# Altium schematic symbol library TitansLib.SchLib: 462 symbols (part 13 of 24)
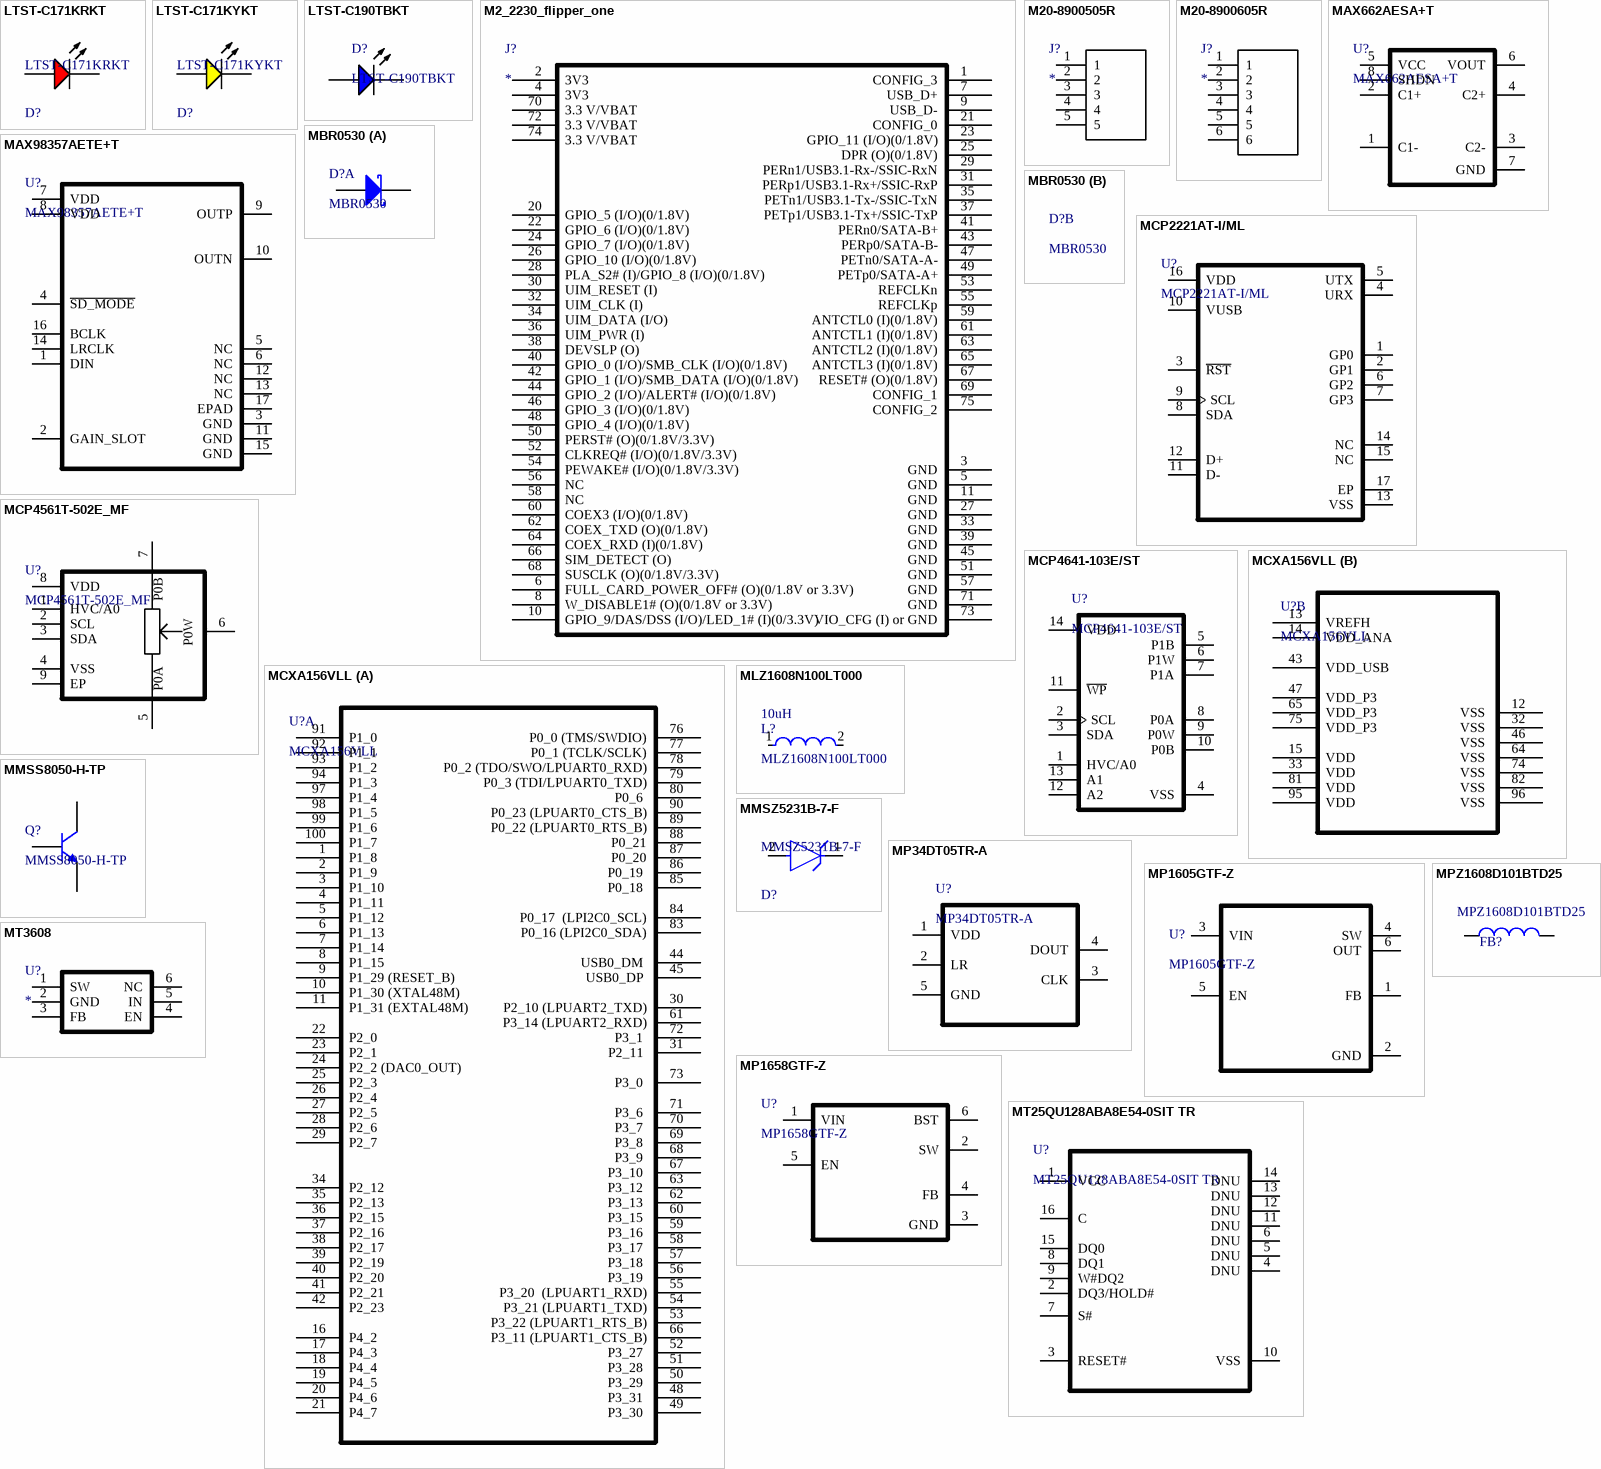
[diagram p29: symbols LTST-C171KRKT to MT3608]

## MCXA156VLL
designator U?
MCU 32-bit ARM Cortex M33 RISC 1MB Flash 1.8V/2.5V/3.3V 100-Pin LQFP Tray; Manufacturer: NXP Semiconductors; Supplier 1: DigiKey; Supplier Part Number 1: 568-MCXA156VLL-ND; Supplier 2: Mouser; Supplier Part Number 2: 771-MCXA156VLL; Supplier: DigiKey; Supplier Part Number: 568-MCXA156VLL-ND; Manufacturer Part Number: MCXA156VLL; RoHS: Compliant; Category: Microcontrollers; Stock: 277; Pricing: 1=6,93, 10=5,334, 90=4,52222, 180=4,35389, 270=4,26963, 540=4,14598, 1080=4,04424, 2520=3,94399 (USD); Lifecycle Status: Production; REACH SVHC: Yes; ComponentLink1URL: http://sigma.octopart.com:80/reach_statement/NXP-Semiconductors-company-13.pdf?src-supplier=Compliance+Statements; ComponentLink1Description: http://sigma.octopart.com:80/reach_statement/NXP-Semiconductors-company-13.pdf?src-supplier=Compliance+Statements; ComponentLink2URL: http://sigma.octopart.com:80/rohs_statement/NXP-Semiconductors-company-12.pdf?src-supplier=Compliance+Statements; ComponentLink2Description: http://sigma.octopart.com:80/rohs_statement/NXP-Semiconductors-company-12.pdf?src-supplier=Compliance+Statements
footprint MCXA156VLL (SQFP, 100-Leads, Body 14,00x14,00mm, Pitch 0,50mm, IPC Medium Density)
part A pins: 1 P1_8, 2 P1_9, 3 P1_10, 4 P1_11, 5 P1_12, 6 P1_13, 7 P1_14 , 8 P1_15 , 9 P1_29 (RESET_B), 10 P1_30 (XTAL48M), 11 P1_31 (EXTAL48M), 16 P4_2 , 17 P4_3 , 18 P4_4 , 19 P4_5 , 20 P4_6 , 21 P4_7 , 22 P2_0 , 23 P2_1 , 24 P2_2 (DAC0_OUT), 25 P2_3 , 26 P2_4 , 27 P2_5 , 28 P2_6 , 29 P2_7 , 30 P2_10 (LPUART2_TXD), 31 P2_11 , 34 P2_12 , 35 P2_13 , 36 P2_15 , 37 P2_16 , 38 P2_17 , 39 P2_19 , 40 P2_20 , 41 P2_21 , 42 P2_23 , 44 USB0_DM , 45 USB0_DP , 48 P3_31 , 49 P3_30 , 50 P3_29 , 51 P3_28 , 52 P3_27 , 53 P3_22 (LPUART1_RTS_B), 54 P3_21 (LPUART1_TXD), 55 P3_20  (LPUART1_RXD), 56 P3_19 , 57 P3_18 , 58 P3_17 , 59 P3_16 , 60 P3_15 , 61 P3_14 (LPUART2_RXD), 62 P3_13 , 63 P3_12 , 66 P3_11 (LPUART1_CTS_B), 67 P3_10 , 68 P3_9 , 69 P3_8 , 70 P3_7 , 71 P3_6 , 72 P3_1 , 73 P3_0 , 76 P0_0 (TMS/SWDIO), 77 P0_1 (TCLK/SCLK), 78 P0_2 (TDO/SWO/LPUART0_RXD), 79 P0_3 (TDI/LPUART0_TXD), 80 P0_6 , 83 P0_16 (LPI2C0_SDA), 84 P0_17  (LPI2C0_SCL), 85 P0_18 , 86 P0_19 , 87 P0_20, 88 P0_21, 89 P0_22 (LPUART0_RTS_B), 90 P0_23 (LPUART0_CTS_B), 91 P1_0 , 92 P1_1 , 93 P1_2 , 94 P1_3 , 97 P1_4 , 98 P1_5, 99 P1_6, 100 P1_7
part B pins: 12 VSS , 13 VREFH , 14 VDD_ANA , 15 VDD , 32 VSS , 33 VDD , 43 VDD_USB , 46 VSS , 47 VDD_P3 , 64 VSS , 65 VDD_P3 , 74 VSS , 75 VDD_P3 , 81 VDD , 82 VSS , 95 VDD , 96 VSS 

## MLZ1608N100LT000
designator L?  value 10uH
Inductor Power Shielded Multi-Layer 10uH 20% 2MHz Ferrite 0.06A 0.78Ohm DCR 0603 T/R; Manufacturer: TDK; Manufacturer Lifecycle Status: PRODUCTION; Current Rating: 300mA; DC Resistance (DCR): 780mΩ; Number of Circuits: 1; Saturation Current: 60mA; Self Resonant Frequency: 50MHz; Supplier: DigiKey; Supplier Part Number: 445-6755-1-ND; Manufacturer Part Number: MLZ1608N100LT000; RoHS: Compliant; Category: Fixed Inductors; Stock: 627893; Pricing: 1=0.1, 10=0.082, 100=0.0677, 1000=0.0557 (USD); Case/Package: 0603; Case Code (Imperial): 0603; Case Code (Metric): 1608; Core Material: Ferrite; Height: 800µm; Height - Seated (Max): 939.8µm; Lead Free: Lead Free; Length: 1.6mm; Lifecycle Status: Production; Max Current Rating: 300mA; Max Length: 1.75mm; Max Operating Temperature: 125°C; Max Width: 950µm; Min Length: 1.45mm; Min Operating Temperature: -55°C; Min Width: 650µm; Mounting Technology: Surface Mount; Number of Terminals: 2; Packaging: Tape & Reel (TR); REACH SVHC: Yes; RMS Current (Irms): 300mA; Schedule B: 8504500000, 8504500000|8504500000|8504500000|8504500000|8504500000|8504500000|8504500000|8504500000|8504500000|8504500000|8504500000|8504500000|8504500000|8504500000|8504500000|8504500000|8504500000|8504500000|8504500000|8504500000|8504500000|8504500000|8504500000|85; ESR: 780mΩ; Shielding: Shielded; Test Frequency: 2MHz; Tolerance: 20%; Width: 800µm; ComponentLink1URL: https://datasheet.octopart.com:443/MLZ1608N100LT000-TDK-datasheet-155327068.pdf?src-supplier=ODG+(Origin+Data+Global); ComponentLink1Description: https://datasheet.octopart.com:443/MLZ1608N100LT000-TDK-datasheet-155327068.pdf?src-supplier=ODG+(Origin+Data+Global); ComponentLink2URL: https://datasheet.octopart.com:443/MLZ1608N100LT000-TDK-datasheet-170576133.pdf?src-supplier=IHS; ComponentLink2Description: https://datasheet.octopart.com:443/MLZ1608N100LT000-TDK-datasheet-170576133.pdf?src-supplier=IHS; ComponentLink3URL: https://datasheet.octopart.com:443/MLZ1608N100LT000-TDK-datasheet-62316133.pdf?src-supplier=Newark; ComponentLink3Description: https://datasheet.octopart.com:443/MLZ1608N100LT000-TDK-datasheet-62316133.pdf?src-supplier=Newark; ComponentLink4URL: https://datasheet.octopart.com:443/MLZ1608N100LT000-TDK-datasheet-136874818.pdf?src-supplier=TME; ComponentLink4Description: https://datasheet.octopart.com:443/MLZ1608N100LT000-TDK-datasheet-136874818.pdf?src-supplier=TME; ComponentLink5URL: https://datasheet.octopart.com:443/MLZ1608N100LT000-TDK-datasheet-164882308.pdf?src-supplier=Burklin+Elektronik; ComponentLink5Description: https://datasheet.octopart.com:443/MLZ1608N100LT000-TDK-datasheet-164882308.pdf?src-supplier=Burklin+Elektronik
footprint INDC1006X08N (Chip Inductor, 2-Leads, Body 1.00x0.60mm, IPC Medium Density)
pins: 1, 2

## MMSS8050-H-TP
designator Q?
Small Signal Bipolar Transistor, 1.5A I(C), 25V V(BR)CEO, 1-Element, NPN, Silicon; Manufacturer: MCC; Package Body Material: Plastic; DC Current Gain-Min (hFE): 200; Number of Elements: 1; Power Dissipation-Max (Abs): 300mW; Time @ Peak Reflow Temperature-Max (s): 10s; Frequency: 100MHz; Qualification Status: Not Qualified; Supplier: Mouser; Supplier Part Number: 833-MMSS8050-H-TP; Manufacturer Part Number: MMSS8050-H-TP; RoHS: Yes; Category: BJTs; Stock: 8044; Pricing: 1=0.14, 10=0.083, 50=0.083, 100=0.052, 1000=0.033, 10000=0.022 (USD); Pins: 3; Package Shape: Rectangular; Terminal Finish: Tin; Transistor Element Material: SILICON; Max Operating Temperature: 150°C; JESD-609 Code: e3; Polarity/Channel Type: NPN; Max Collector Current: 1.5A; Collector-emitter Voltage-Max: 25V; JESD-30 Code: R-PDSO-G3; Moisture Sensitivity Level: 1; Package Style: SMALL OUTLINEMeter; Peak Reflow Temperature (Cel): 260°C; Surface Mount: Yes; Terminal Form: Gull Wing; Terminal Position: DUAL; Reach SVHC Compliant: Yes; RoHS Compliant: Yes; ComponentLink1URL: https://datasheet.ciiva.com:443/pdfs/VipMasterIC/IC/MCCC/MCCC-S-A0009689717/MCCC-S-A0009689962-1.pdf?src-supplier=IHS+Markit; ComponentLink1Description: https://datasheet.ciiva.com:443/pdfs/VipMasterIC/IC/MCCC/MCCC-S-A0009689717/MCCC-S-A0009689962-1.pdf?src-supplier=IHS+Markit; ComponentLink2URL: https://datasheet.ciiva.com/16291/mmss8050-255048-16291447.pdf?src-supplier=Mouser; ComponentLink2Description: https://datasheet.ciiva.com/16291/mmss8050-255048-16291447.pdf?src-supplier=Mouser; ComponentLink3URL: https://datasheet.ciiva.com/972/mmss8050sot-23-972893.pdf?src-supplier=Digikey; ComponentLink3Description: https://datasheet.ciiva.com/972/mmss8050sot-23-972893.pdf?src-supplier=Digikey; ComponentLink4URL: https://datasheet.ciiva.com/972/mmss8050sot-23-972894.pdf?src-supplier=Digikey; ComponentLink4Description: https://datasheet.ciiva.com/972/mmss8050sot-23-972894.pdf?src-supplier=Digikey; ComponentLink5URL: https://datasheet.ciiva.com/972/mmss8050sot-23-972895.pdf?src-supplier=Digikey; ComponentLink5Description: https://datasheet.ciiva.com/972/mmss8050sot-23-972895.pdf?src-supplier=Digikey
footprint SI1308EDL
pins: 1 B, 2 E, 3 C

## MMSZ5231B-7-F
designator D?
MMSZ5231B-7 Series 500 mW 5.1 V 10 mA Surface Mount Zener Diode - SOD-123; Manufacturer: Diodes; Standoff Height: 0mm; Max Zener Voltage: 5.36V; Max Reverse Leakage Current: 5uA; Max Junction Temp: +150°C; Nom Zener Voltage: 5.1V; Power Dissipation: 370mW; Zener Impedance: 17Ω; Element Configuration: Single; ESD Protection: No; Forward Voltage: 900mV; Max Junction Temperature (Tj): 150°C; Number of Elements: 1; Peak Reverse Current: 5µA; Polarity: Unidirectional; Power Rating: 500mW; Reverse Standoff Voltage: 2V; Test Current: 20mA; Tolerance: 5%; Voltage Tolerance: 4.99%; Temperature: -65°C to +150°C; RoHS: TRUE; ComponentLink2Description: Datasheet; Octopart: https://octopart.com/mmsz5231b-7-f-diodes+inc.-55400050; Height: 1.45mm; ComponentLink2URL: https://www.diodes.com/assets/Datasheets/ds18010.pdf; Footprint Url: https://www.diodes.com/assets/Package-Files/SOD123.pdf; Device Class L2: Diodes; Temperature Range Low: -65°C; Mouser Description: Zener Diodes 5.1V 500mW; Manufacturer Part Number: MMSZ5231B-7-F; Digikey Description: DIODE ZENER 5.1V 500MW SOD123; Device Class L1: Discrete Semiconductors; Device Class L3: Zener Diodes; Lead Free: Yes; Category: Diode; Automotive: No; Package: SOD123; Temperature Range High: +150°C; Supplier: Avnet; Supplier Part Number: MMSZ5231B-7-F; Stock: 309000; Pricing: 3000=0,01771, 6000=0,01722, 12000=0,01699, 24000=0,01676, 48000=0,01653 (USD); Case/Package: SOD-123-2; China RoHS: Compliant; Composition: Zener; Contact Plating: Tin; Country of Origin: Mainland China; Export Control Classification Number (ECCN) Code: EAR99; Harmonized Tariff Schedule (HTS) Code: 8541.10.00.50; Impedance: 17Ω; Introduction Date: 2002-09-13; Length: 3.85mm; Lifecycle Status: Production; Max Operating Temperature: 150°C; Max Power Dissipation: 370mW; Min Operating Temperature: -65°C; Mounting Technology: Surface Mount; Pins: 2; Number of Terminals: 2; Packaging: Cut Tape; Radiation Hardening: No; REACH SVHC: Yes; Reference Voltage: 5.1V; Schedule B: 8541100050, 8541100050|8541100050|8541100050|8541100050|8541100050|8541100050|8541100050|8541100050|8541100050|8541100050|8541100050|8541100050|8541100050|8541100050|8541100050|8541100050|8541100050|8541100050|8541100050|8541100050|8541100050|8541100050|8541100050|85; Termination: SMD/SMT; Voltage Rating (DC): 5.1V; Weight: 10.007382mg; Width: 1.7mm; Working Voltage: 5.1V; Zener Current: 20mA; Zener Voltage: 5.1V; ComponentLink1URL: https://datasheet.octopart.com:443/MMSZ5231B-7-F-Diodes-Inc.-datasheet-149521387.pdf?src-supplier=Newark; ComponentLink1Description: https://datasheet.octopart.com:443/MMSZ5231B-7-F-Diodes-Inc.-datasheet-149521387.pdf?src-supplier=Newark; ComponentLink3URL: https://datasheet.octopart.com:443/MMSZ5231B-7-F-Diodes-Inc.-datasheet-12519528.pdf?src-supplier=Newark; ComponentLink3Description: https://datasheet.octopart.com:443/MMSZ5231B-7-F-Diodes-Inc.-datasheet-12519528.pdf?src-supplier=Newark; ComponentLink4URL: https://datasheet.octopart.com:443/MMSZ5231B-7-F-Diodes-Inc.-datasheet-10631512.pdf?src-supplier=Newark; ComponentLink4Description: https://datasheet.octopart.com:443/MMSZ5231B-7-F-Diodes-Inc.-datasheet-10631512.pdf?src-supplier=Newark; ComponentLink5URL: https://datasheet.octopart.com:443/MMSZ5231B-7-F-Diodes-Inc.-datasheet-10407984.pdf?src-supplier=Newark; ComponentLink5Description: https://datasheet.octopart.com:443/MMSZ5231B-7-F-Diodes-Inc.-datasheet-10407984.pdf?src-supplier=Newark; ComponentLink6URL: https://datasheet.octopart.com:443/MMSZ5231B-7-F-Diodes-Inc.-datasheet-10027056.pdf?src-supplier=Newark; ComponentLink6Description: https://datasheet.octopart.com:443/MMSZ5231B-7-F-Diodes-Inc.-datasheet-10027056.pdf?src-supplier=Newark; ComponentLink7URL: https://datasheet.octopart.com:443/MMSZ5231B-7-F-Diodes-Inc.-datasheet-5320879.pdf?src-supplier=Newark; ComponentLink7Description: https://datasheet.octopart.com:443/MMSZ5231B-7-F-Diodes-Inc.-datasheet-5320879.pdf?src-supplier=Newark; ComponentLink8URL: https://sigma.octopart.com:443/138895985/technical_drawing/Diodes-Inc.-MMSZ5231B-7-F.pdf?src-supplier=Diodes+Inc+SCT; ComponentLink8Description: https://sigma.octopart.com:443/138895985/technical_drawing/Diodes-Inc.-MMSZ5231B-7-F.pdf?src-supplier=Diodes+Inc+SCT; ComponentLink9URL: https://datasheet.octopart.com:443/MMSZ5231B-7-F-Diodes-Inc.-datasheet-4024.pdf?src-supplier=DigiKey; ComponentLink9Description: https://datasheet.octopart.com:443/MMSZ5231B-7-F-Diodes-Inc.-datasheet-4024.pdf?src-supplier=DigiKey; ComponentLink10URL: https://datasheet.octopart.com:443/MMSZ5231B-7-F-Diodes-Inc.-datasheet-103774855.pdf?src-supplier=TME; ComponentLink10Description: https://datasheet.octopart.com:443/MMSZ5231B-7-F-Diodes-Inc.-datasheet-103774855.pdf?src-supplier=TME; ComponentLink11URL: https://datasheet.octopart.com:443/MMSZ5231B-7-F-Diodes-Inc.-datasheet-14050909.pdf?src-supplier=iiiC; ComponentLink11Description: https://datasheet.octopart.com:443/MMSZ5231B-7-F-Diodes-Inc.-datasheet-14050909.pdf?src-supplier=iiiC; ComponentLink12URL: https://datasheet.octopart.com:443/MMSZ5231B-7-F-Diodes-Inc.-datasheet-17703277.pdf?src-supplier=Jameco; ComponentLink12Description: https://datasheet.octopart.com:443/MMSZ5231B-7-F-Diodes-Inc.-datasheet-17703277.pdf?src-supplier=Jameco; ComponentLink13URL: http://sigma.octopart.com:80/15616952/materials_sheet/Diodes-Inc.-MMSZ5231B-7-F.pdf?src-supplier=Compliance+Statements; ComponentLink13Description: http://sigma.octopart.com:80/15616952/materials_sheet/Diodes-Inc.-MMSZ5231B-7-F.pdf?src-supplier=Compliance+Statements; Supplier 1: DigiKey; Supplier Part Number 1: MMSZ5231B-FDICT-ND; Supplier 2: DigiKey; Supplier Part Number 2: MMSZ5231B-FDIDKR-ND; Supplier 3: Mouser; Supplier Part Number 3: 621-MMSZ5231B-F
footprint MMSZ5231B-7-F (TSOP, 2-Leads, Body 1,55x2,70mm, Pitch 1,00mm, IPC Low Density)
pins: 1 C, 2 A

## MP34DT05TR-A
designator U?
Consumer Circuit, CMOS, CBGA4; Manufacturer: STMicroelectronics; Package Body Material: Metal; Channels: 1; Max Supply Voltage: 3.6V; Min Supply Voltage: 1.6V; Supplier: Digikey; Supplier Part Number: 497-17809-1-ND; Manufacturer Part Number: MP34DT05TR-A; RoHS: Yes; Category: Microphones; Stock: 111434; Pricing: 1=1.66, 10=1.35, 25=1.2436, 50=1.1694, 100=1.0995, 250=1.05264 (USD); Case/Package: LGA; Pins: 4; Package Shape: Rectangular; Terminal Finish: Nickel; Min Operating Temperature: -40°C; Max Operating Temperature: 85°C; JESD-609 Code: e4; Consumer IC Type: CONSUMER CIRCUIT; Moisture Sensitivity Level: 3; Package Style: GRID ARRAYMeter; Surface Mount: Yes; Technology: CMOS; Terminal Form: BUTT; Terminal Position: BOTTOM; Length: 4mm; Width: 3mm; Height - Seated (Max): 1.1mm; Temperature Grade: INDUSTRIAL; Reach SVHC Compliant: Yes; RoHS Compliant: Yes; ComponentLink1URL: https://datasheet.ciiva.com:443/pdfs/VipMasterIC/IC/SGST/SGST-S-A0008042494/SGST-S-A0008042494-1.pdf?src-supplier=IHS+Markit; ComponentLink1Description: https://datasheet.ciiva.com:443/pdfs/VipMasterIC/IC/SGST/SGST-S-A0008042494/SGST-S-A0008042494-1.pdf?src-supplier=IHS+Markit; ComponentLink2URL: http://www.farnell.com/datasheets/2600073.pdf?src-supplier=Farnell; ComponentLink2Description: http://www.farnell.com/datasheets/2600073.pdf?src-supplier=Farnell; ComponentLink3URL: http://www.farnell.com/datasheets/2600073.pdf?src-supplier=Newark; ComponentLink3Description: http://www.farnell.com/datasheets/2600073.pdf?src-supplier=Newark; ComponentLink4URL: http://www.farnell.com/datasheets/2600073.pdf?src-supplier=Element14; ComponentLink4Description: http://www.farnell.com/datasheets/2600073.pdf?src-supplier=Element14; ComponentLink5URL: https://datasheet.octopart.com/MP34DT05TR-A-STMicroelectronics-datasheet-101522148.pdf?src-supplier=Element14; ComponentLink5Description: https://datasheet.octopart.com/MP34DT05TR-A-STMicroelectronics-datasheet-101522148.pdf?src-supplier=Element14; ComponentLink6URL: http://www.st.com/content/ccc/resource/technical/document/datasheet/group3/c7/90/d3/f6/b7/e7/40/c8/DM00415595/files/DM00415595.pdf/jcr:content/translations/en.DM00415595.pdf?src-supplier=Digikey; ComponentLink6Description: http://www.st.com/content/ccc/resource/technical/document/datasheet/group3/c7/90/d3/f6/b7/e7/40/c8/DM00415595/files/DM00415595.pdf/jcr:content/translations/en.DM00415595.pdf?src-supplier=Digikey; Supplier 1: Digikey; Supplier Part Number 1: 497-17809-1-ND
pins: 1 VDD, 2 LR, 3 CLK, 4 DOUT, 5 GND

## MP1605GTF-Z
designator U?
2A 5.5V 2.2MHz Synchronous Step-Down Converter with Low11&micro;A Quiescent Current in SOT563 Package; Manufacturer: Monolithic Power Systems; Copyright: Copyright (C) 2025 Ultra Librarian. All rights reserved.; Manufacturer Part Number: MP1605GTF-Z; Datasheet: https://www.monolithicpower.com/en/documentview/productdocument/index/version/2/document_type/Datasheet/lang/en/sku/MP1605
footprint SOT563_MP1605_MNP-L
pins: 1 FB, 2 GND, 3 VIN, 4 SW, 5 EN, 6 OUT

## MP1658GTF-Z
designator U?
16V, 3A, 600kHz, High-Efficiency, / Synchronous, Step-Down Converter / In a SOT563 Package; Manufacturer: Monolithic Power Systems; Manufacturer Part Number: MP1658GTF-Z; Package: SOT-563
footprint SOT563_MP1605_MNP-L
pins: 1 VIN, 2 SW, 3 GND, 4 FB, 5 EN, 6 BST

## MPZ1608D101BTD25
designator FB?
100 Ohms @ 100 MHz 1 Power Line Ferrite Bead 0603 (1608 Metric) 1A 150mOhm; Manufacturer 1: TDK; Supplier 1: DigiKey; Manufacturer Part Number 1: MPZ1608D101BTD25; Supplier Part Number 1: 445-MPZ1608D101BTD25CT-ND; Supplier Link 1: https://www.digikey.com.br/en/products/detail/tdk-corporation/MPZ1608D101BTD25/5040308; Supplier Unit Price 1: 0.1
footprint INDC1005X06N (Chip Inductor, 2-Leads, Body 1.00x0.50mm, IPC Medium Density)
pins: 1, 2

## MT25QU128ABA8E54-0SIT TR
designator U?
FLASH - NOR Memory IC 128Mbit SPI - Quad I/O 133 MHz 15-XFWLBGA; Manufacturer: Micron Technology Inc.; Supper Unit Price: 7.33; Supplier: DigiKey; Supplier Part Number: 557-1989-2-ND; Supplier Link: https://www.digikey.com/en/products/detail/micron-technology-inc/MT25QU128ABA8E54-0SIT-TR/8537498; Manufaturer Part Number: MT25QU128ABA8E54-0SIT TR; Datasheet: https://mm.digikey.com/Volume0/opasdata/d220001/medias/docus/6657/MT25QU128ABA8ESF-0SIT.pdf
pins: 1 VCC, 2 DQ3/HOLD#, 3 RESET#, 4 DNU, 5 DNU, 6 DNU, 7 S#, 8 DQ1, 9 W#DQ2, 10 VSS, 11 DNU, 12 DNU, 13 DNU, 14 DNU, 15 DQ0, 16 C

## MT3608
designator U?
1.2MHz Boost Adjustable 2A SOT-23-6 Voltage Regulators - DC DC Switching Regulators RoHS; Manufacturer 1: Aerosemi; Manufacturer Part Number 1: MT3608; Datasheet Link: https://www.olimex.com/Products/Breadboarding/BB-PWR-3608/resources/MT3608.pdf; Height: 1.45mm; Supplier Part Number 1: C84817; Supplier 1: LCSC; Supplier Unit Price 1: 0.0786
footprint SOT95P280X145-6N
pins: 1 SW, 2 GND, 3 FB, 4 EN, 5 IN, 6 NC

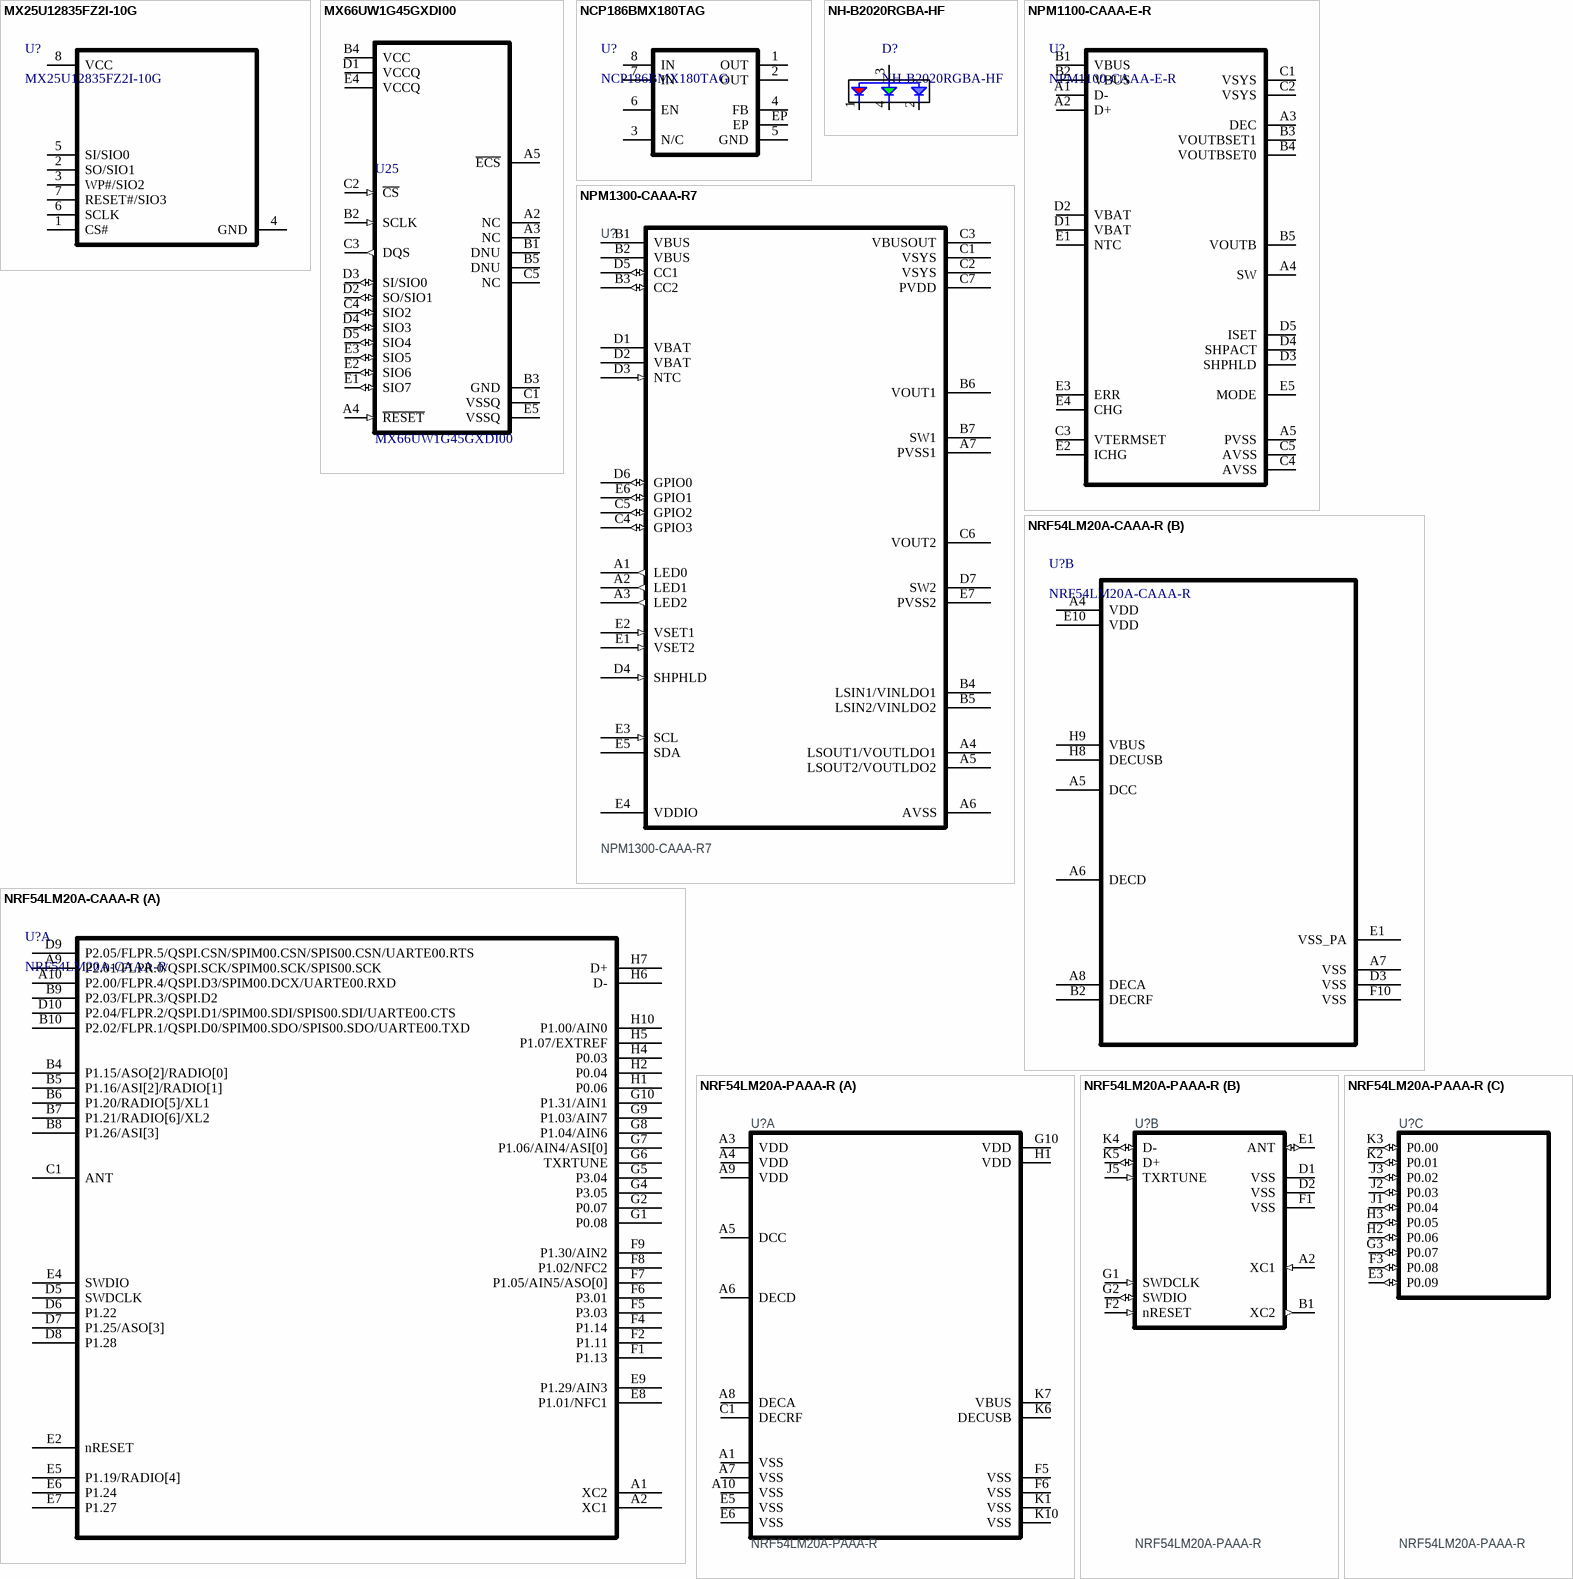
[diagram p8: symbols MX25U12835FZ2I-10G to NRF54LM20A-PAAA-R]

## MX25U12835FZ2I-10G
designator U?
MX25U Series 1.8 V 128 Mb (x 1/x 2/x 4) 104 MHz Industrial Serial Flash - WSON-8; Manufacturer: Macronix; Density: 128Mb; Frequency: 104MHz; Max Supply Current: 20mA; Max Supply Voltage: 2V; Min Supply Voltage: 1.65V; Number of Circuits: 1; Operating Supply Voltage: 1.8V; Supplier: DigiKey; Supplier Part Number: 1092-1136-ND; Manufacturer Part Number: MX25U12835FZ2I-10G; RoHS: Compliant; Category: Flash; Stock: 480; Pricing: 1=4.46, 10=4.16, 25=4.0376, 50=3.9444, 100=3.8512, 480=3.64213, 960=3.5512, 1440=3.49862 (USD); Case/Package: 104; Height - Seated (Max): 800µm; Interface: Serial; Lead Free: Lead Free; Length: 8mm; Lifecycle Status: Production; Clock Frequency: 104MHz; Max Operating Temperature: 85°C; Memory Format: FLASH; Min Operating Temperature: -40°C; Number of Terminals: 8; REACH SVHC: Yes; Schedule B: 8542320070, 8542320070|8542320070|8542320070|8542320070|8542320070; Temperature Grade: Industrial; Terminal Pitch: 1.27mm; Width: 6mm; ComponentLink1URL: https://datasheet.octopart.com:443/MX25U12835FZ2I-10G-Macronix-datasheet-134128073.pdf?src-supplier=IHS; ComponentLink1Description: https://datasheet.octopart.com:443/MX25U12835FZ2I-10G-Macronix-datasheet-134128073.pdf?src-supplier=IHS; ComponentLink2URL: https://datasheet.octopart.com:443/MX25U12835FZ2I-10G-Macronix-datasheet-137404896.pdf?src-supplier=SHENGYU+ELECTRONICS; ComponentLink2Description: https://datasheet.octopart.com:443/MX25U12835FZ2I-10G-Macronix-datasheet-137404896.pdf?src-supplier=SHENGYU+ELECTRONICS; ComponentLink3URL: https://datasheet.octopart.com:443/MX25U12835FZ2I-10G-Macronix-datasheet-101783967.pdf?src-supplier=Future+Electronics; ComponentLink3Description: https://datasheet.octopart.com:443/MX25U12835FZ2I-10G-Macronix-datasheet-101783967.pdf?src-supplier=Future+Electronics; ComponentLink4URL: https://datasheet.octopart.com:443/MX25U12835FZ2I-10G-Macronix-datasheet-15540238.pdf?src-supplier=Future+Electronics; ComponentLink4Description: https://datasheet.octopart.com:443/MX25U12835FZ2I-10G-Macronix-datasheet-15540238.pdf?src-supplier=Future+Electronics; ComponentLink5URL: https://datasheet.octopart.com:443/MX25U12835FZ2I-10G-Macronix-datasheet-24950634.pdf?src-supplier=Future+Electronics; ComponentLink5Description: https://datasheet.octopart.com:443/MX25U12835FZ2I-10G-Macronix-datasheet-24950634.pdf?src-supplier=Future+Electronics; ComponentLink6URL: https://datasheet.octopart.com:443/MX25U12835FZ2I-10G-Macronix-datasheet-140481030.pdf?src-supplier=Augswan; ComponentLink6Description: https://datasheet.octopart.com:443/MX25U12835FZ2I-10G-Macronix-datasheet-140481030.pdf?src-supplier=Augswan; Supplier 1: DigiKey; Supplier Part Number 1: 1092-1136-ND
footprint SON127P600X80_HS-9N (SON, 8-Leads, Body 5.00x6.00mm, Pitch 1.27mm, Thermal Pad 4.00x3.40mm, IPC Medium Density)
pins: 1 CS#, 2 SO/SIO1, 3 WP#/SIO2, 4 GND, 5 SI/SIO0, 6 SCLK, 7 RESET#/SIO3, 8 VCC

## MX66UW1G45GXDI00
designator U25
Tray-nor Flash Serial Nor 1.8V 1GBIT X8 I/o BGA-24 Rww; Manufacturer: Macronix; ComponentLink1URL: http://tunmcdsvn.tun.st.com/Component_Documentation_Library/Trunk/IC/MACRONIX_MX66UW1G45GDI00; Supplier: DigiKey; Supplier Part Number: 1092-MX66UW1G45GXDI00-ND; Manufacturer Part Number: MX66UW1G45GXDI00; RoHS: Compliant; Category: Memory; Stock: 331; Pricing: 1=16.69, 10=15.484, 25=14.9996, 50=14.6354, 100=14.2743, 480=13.47456 (USD); ComponentLink2URL: https://datasheet.octopart.com:443/MX66UW1G45GXDI00-Macronix-datasheet-163679541.pdf?src-supplier=element14+APAC; ComponentLink2Description: https://datasheet.octopart.com:443/MX66UW1G45GXDI00-Macronix-datasheet-163679541.pdf?src-supplier=element14+APAC; Supplier 1: DigiKey; Supplier Part Number 1: 1092-MX66UW1G45GXDI00-ND
footprint ICC_BGA24_5X5-BALL-ARRAY_6X8_P1
pins: A2 NC, A3 NC, A4 ~{RESET} (in), A5 ~{ECS}, B1 DNU, B2 SCLK (in), B3 GND (power), B4 VCC (power), B5 DNU, C1 VSSQ (power), C2 ~{CS} (in), C3 DQS (out), C4 SIO2 (io), C5 NC, D1 VCCQ (power), D2 SO/SIO1 (io), D3 SI/SIO0 (io), D4 SIO3 (io), D5 SIO4 (io), E1 SIO7 (io), E2 SIO6 (io), E3 SIO5 (io), E4 VCCQ (power), E5 VSSQ (power)

## NCP186BMX180TAG
designator U?
75dB@(1kHz) 1A null 1.8V positive 5.5V DFN-8(1.2x1.6) Linear Voltage Regulators (LDO) ROHS; Manufacturer: onsemi; Manufacturer Lifecycle Status: ACTIVE; Dropout Voltage: 175mV; Max Junction Temperature (Tj): 125°C; Min Current Limit: 1.1A; Number of Channels: 2; Number of Circuits: 1; Voltage Tolerance: 1%; Supplier: DigiKey; Supplier Part Number: 488-NCP186BMX180TAGCT-ND; Manufacturer Part Number: NCP186BMX180TAG; RoHS: Compliant; Category: LDO Voltage Regulators; Stock: 8824; Pricing: 1=0.36, 10=0.247, 25=0.22, 100=0.1897, 250=0.17532, 500=0.16662, 1000=0.15948, 2500=0.15194 (USD); China RoHS: Compliant; Height - Seated (Max): 450µm; Lead Free: Lead Free; Length: 1.6mm; Lifecycle Status: Production; Max Supply Voltage: 5.5V; Max Operating Temperature: 125°C; Min Input Voltage: 1.8V; Min Operating Temperature: -40°C; Number of Outputs: 1; Number of Regulators: 1; Number of Terminals: 8; Output Current: 1A; Output Voltage: 1.8V; Packaging: Tape & Reel (TR); REACH SVHC: Yes; Terminal Pitch: 400µm; Width: 1.2mm; ComponentLink1URL: https://datasheet.octopart.com:443/NCP186BMX180TAG-onsemi-datasheet-180965205.pdf?src-supplier=IHS; ComponentLink1Description: https://datasheet.octopart.com:443/NCP186BMX180TAG-onsemi-datasheet-180965205.pdf?src-supplier=IHS; ComponentLink2URL: https://datasheet.octopart.com:443/NCP186BMX180TAG-ON-Semiconductor-datasheet-139012264.pdf?src-supplier=Master+Electronics; ComponentLink2Description: https://datasheet.octopart.com:443/NCP186BMX180TAG-ON-Semiconductor-datasheet-139012264.pdf?src-supplier=Master+Electronics; ComponentLink3URL: https://datasheet.octopart.com:443/NCP186BMX180TAG-ON-Semiconductor-datasheet-43340286.pdf?src-supplier=Augswan; ComponentLink3Description: https://datasheet.octopart.com:443/NCP186BMX180TAG-ON-Semiconductor-datasheet-43340286.pdf?src-supplier=Augswan; ComponentLink4URL: https://datasheet.octopart.com:443/NCP186BMX180TAG-onsemi-datasheet-168050616.pdf?src-supplier=Future+Electronics; ComponentLink4Description: https://datasheet.octopart.com:443/NCP186BMX180TAG-onsemi-datasheet-168050616.pdf?src-supplier=Future+Electronics; ComponentLink5URL: https://datasheet.octopart.com:443/NCP186BMX180TAG-onsemi-datasheet-158873290.pdf?src-supplier=TME; ComponentLink5Description: https://datasheet.octopart.com:443/NCP186BMX180TAG-onsemi-datasheet-158873290.pdf?src-supplier=TME; ComponentLink6URL: http://sigma.octopart.com:80/150622428/rohs_statement/ON-Semiconductor-NCP186BMX180TAG.pdf?src-supplier=Compliance+Statements; ComponentLink6Description: http://sigma.octopart.com:80/150622428/rohs_statement/ON-Semiconductor-NCP186BMX180TAG.pdf?src-supplier=Compliance+Statements; ComponentLink7URL: http://sigma.octopart.com:80/reach_statement/ON-Semiconductor-company-79.pdf?src-supplier=Compliance+Statements; ComponentLink7Description: http://sigma.octopart.com:80/reach_statement/ON-Semiconductor-company-79.pdf?src-supplier=Compliance+Statements; ComponentLink8URL: https://octopart.com:443/opatz8j6/c1?t=3ZHJq1zRwEfeA8_FaBHcWh3KQpkaPF06rW0UOSR3tjvyECcYewp8m0mg086wQp5eNwENq6TVPyTzyK_vM6avR3gqb0S7tRUfzq0CbKoOOsGbLBLfeoEG7YKUKaiZufJ_w9rTcRMvyNluoQ0R7lD4km3LWbjYEEPzTsT76VI1KnSA3qWC91RhnQAssLHpyCQA0KpSYzLxXEj4ZME4FX0dw4L7IGa3YM0ExcGh1GjRbIITpA6ngQpWqVURaAFzyI_I5gVutcawDpPwz_B0TfF4PW3HofiuYjeu37FWKEw9C8XRYicAzl5HSqVNfGKP5b5pK4mzM5gr44W79ByoCW3N8YMURXPbr2jDsv5NULMP3hD25A&src-supplier=Compliance+Statements; ComponentLink8Description: https://octopart.com:443/opatz8j6/c1?t=3ZHJq1zRwEfeA8_FaBHcWh3KQpkaPF06rW0UOSR3tjvyECcYewp8m0mg086wQp5eNwENq6TVPyTzyK_vM6avR3gqb0S7tRUfzq0CbKoOOsGbLBLfeoEG7YKUKaiZufJ_w9rTcRMvyNluoQ0R7lD4km3LWbjYEEPzTsT76VI1KnSA3qWC91RhnQAssLHpyCQA0KpSYzLxXEj4ZME4FX0dw4L7IGa3YM0ExcGh1GjRbIITpA6ngQpWqVURaAFzyI_I5gVutcawDpPwz_B0TfF4PW3HofiuYjeu37FWKEw9C8XRYicAzl5HSqVNfGKP5b5pK4mzM5gr44W79ByoCW3N8YMURXPbr2jDsv5NULMP3hD25A&src-supplier=Compliance+Statements; ComponentLink9URL: https://octopart.com:443/opatz8j6/c1?t=aSiek63A-P_gyTwd1Cn16fy8xS-H634FeZfr6G_43QvZJ1_23XpPuRgYguhlKadfohnX9_pEd7-YpFfBgXp5DzbMXd-DB0jj_gh_y_R4RJH5hLnF3RYd5bD9RylALuenm8-Dv5NEq5Oafkf_4zOzimWUq0vtqIeYG7n68ODbIMK91KtGvl9lp8GjjSdmjY4UmTnIZMICN0mFUMOhJZ6SzXoltuKH8Ik9b2QClm7OsyKPcKAeC4RKH6m8AMpvJBYN8iJLj-jfQjQTRozJSKXnDd0eqQWXAfA30eUkBE_TrL1B5Cah0r2dEG9jYtP_RM6M3bEY5d1wjle70YC0b6zJk455AWaqDJANwfXcONxyyHGaMPI&src-supplier=Compliance+Statements; ComponentLink9Description: https://octopart.com:443/opatz8j6/c1?t=aSiek63A-P_gyTwd1Cn16fy8xS-H634FeZfr6G_43QvZJ1_23XpPuRgYguhlKadfohnX9_pEd7-YpFfBgXp5DzbMXd-DB0jj_gh_y_R4RJH5hLnF3RYd5bD9RylALuenm8-Dv5NEq5Oafkf_4zOzimWUq0vtqIeYG7n68ODbIMK91KtGvl9lp8GjjSdmjY4UmTnIZMICN0mFUMOhJZ6SzXoltuKH8Ik9b2QClm7OsyKPcKAeC4RKH6m8AMpvJBYN8iJLj-jfQjQTRozJSKXnDd0eqQWXAfA30eUkBE_TrL1B5Cah0r2dEG9jYtP_RM6M3bEY5d1wjle70YC0b6zJk455AWaqDJANwfXcONxyyHGaMPI&src-supplier=Compliance+Statements; Supplier 1: DigiKey; Supplier Part Number 1: 488-NCP186BMX180TAGCT-ND; Supplier 2: DigiKey; Supplier Part Number 2: 488-NCP186BMX180TAGTR-ND; Supplier 3: Mouser; Supplier Part Number 3: 863-NCP186BMX180TAG
footprint ICC_DFN8-EPAD_1P6X1P2_P040_H0P45 (MCD-02937)
pins: 1 OUT, 2 OUT, 3 N/C, 4 FB, 5 GND, 6 EN, 7 IN, 8 IN, EP

## NH-B2020RGBA-HF
designator D?
SMD,2.1x2.1mm LED Indication - Discrete ROHS; Manufacturer Part Number: NH-B2020RGBA-HF; Supplier: LCSC; Supplier Part Number: C2874116
footprint NH-B2020RGBA-HF
pins: 1, 2, 3, 4

## NPM1100-CAAA-E-R
designator U?
PMIC with battery charger 20-400mA, 1x Buck, 2x LED drivers, pin configurable; Manufacturer: Nordic Semiconductor; Supplier: DigiKey; Supplier Part Number: 4823-NPM1100-CAAA-E-RCT-ND; Manufacturer Part Number: NPM1100-CAAA-E-R; Category: Battery Management; Stock: 9562; Pricing: 1=1.87, 10=1.374, 25=1.2504, 100=1.1146, 250=1.04992, 500=1.01092, 1000=0.97883 (USD); ComponentLink1URL: https://datasheet.octopart.com:443/NPM1100-CAAA-E-R-Nordic-Semiconductor-datasheet-189103467.pdf?src-supplier=Future+Electronics; ComponentLink1Description: https://datasheet.octopart.com:443/NPM1100-CAAA-E-R-Nordic-Semiconductor-datasheet-189103467.pdf?src-supplier=Future+Electronics; Supplier 1: DigiKey; Supplier Part Number 1: 4823-NPM1100-CAAA-E-RCT-ND; Supplier 2: DigiKey; Supplier Part Number 2: 4823-NPM1100-CAAA-E-RTR-ND; Supplier 3: Mouser; Supplier Part Number 3: 949-NPM1100-CAAA-R
footprint BGA25C40P5X5_200X200X50
pins: A1 D- "USB D- data line", A2 D+ "USB D+ data line", A3 DEC "System decoupling capacitor", A4 SW "BUCK regulator output (to inductor)", A5 PVSS "Ground (DC/DC)", B1 VBUS "Input supply", B2 VBUS "Input supply", B3 VOUTBSET1 "BUCK regulator output voltage selection", B4 VOUTBSET0 "BUCK regulator output voltage selection", B5 VOUTB "BUCK regulator output", C1 VSYS "System voltage output (auto-enabled after POR)", C2 VSYS "System voltage output (auto-enabled after POR)", C3 VTERMSET "Battery charging termination voltage selection", C4 AVSS "Ground", C5 AVSS "Ground", D1 VBAT "Battery connection", D2 VBAT "Battery connection", D3 SHPHLD "Shipping mode hold", D4 SHPACT "Shipping mode activate", D5 ISET "VBUS current limit selection (100 mA / 500 mA)", E1 NTC "NTC resistor connection", E2 ICHG "Charge current limiting resistor connection", E3 ERR "Open-drain LED driver (Charging Error)", E4 CHG "Open-drain LED driver (Battery Charging)", E5 MODE "0-automatic / 1-Forced PWM"

## NPM1300-CAAA-R7
designator U?
NPM1300 Series 800 mA Linear Battery Charger Power Management IC - WLCSP-35; Manufacturer: Nordic Semiconductor; Max Supply Voltage: 5.5V; Min Supply Voltage: 4V; Number of Channels: 4; Number of Circuits: 1; Operating Supply Voltage: 5V; Author: FRS; Supplier: DigiKey; Supplier Part Number: 4823-NPM1300-CAAA-R7CT-ND; Manufacturer Part Number: NPM1300-CAAA-R7; RoHS: Compliant; Category: Battery Management; Stock: 2662; Pricing: 1=2.87, 10=2.141, 25=1.9596, 100=1.7605, 250=1.66544, 500=1.60818 (USD); China RoHS: Compliant; Height - Seated (Max): 512µm; Length: 3.0775mm; Max Operating Temperature: 85°C; Min Operating Temperature: -40°C; Number of Terminals: 35; REACH SVHC: Yes; Terminal Pitch: 440µm; Width: 2.3775mm; ComponentLink1URL: https://datasheet.octopart.com:443/NPM1300-CAAA-R7-Nordic-Semiconductor-datasheet-180931109.pdf?src-supplier=IHS; ComponentLink1Description: https://datasheet.octopart.com:443/NPM1300-CAAA-R7-Nordic-Semiconductor-datasheet-180931109.pdf?src-supplier=IHS; ComponentLink2URL: https://datasheet.octopart.com:443/NPM1300-CAAA-R7-Nordic-Semiconductor-datasheet-189103468.pdf?src-supplier=Future+Electronics; ComponentLink2Description: https://datasheet.octopart.com:443/NPM1300-CAAA-R7-Nordic-Semiconductor-datasheet-189103468.pdf?src-supplier=Future+Electronics; Supplier 1: DigiKey; Supplier Part Number 1: 4823-NPM1300-CAAA-R7CT-ND; Supplier 2: DigiKey; Supplier Part Number 2: 4823-NPM1300-CAAA-R7TR-ND; Supplier 3: Mouser; Supplier Part Number 3: 949-NPM1300-CAAA-R7
footprint WLCSP-35_308X238X50 (Footprint not found)
pins: A1 LED0 (out), A2 LED1 (out), A3 LED2 (out), A4 LSOUT1/VOUTLDO1 (power), A5 LSOUT2/VOUTLDO2 (power), A6 AVSS (power), A7 PVSS1 (power), B1 VBUS (power), B2 VBUS (power), B3 CC2 (io), B4 LSIN1/VINLDO1 (power), B5 LSIN2/VINLDO2 (power), B6 VOUT1 (power), B7 SW1 (power), C1 VSYS (power), C2 VSYS (power), C3 VBUSOUT (power), C4 GPIO3 (io), C5 GPIO2 (io), C6 VOUT2 (power), C7 PVDD (power), D1 VBAT, D2 VBAT, D3 NTC (in), D4 SHPHLD (in), D5 CC1 (io), D6 GPIO0 (io), D7 SW2 (power), E1 VSET2 (in), E2 VSET1 (in), E3 SCL (in), E4 VDDIO (power), E5 SDA (oc), E6 GPIO1 (io), E7 PVSS2 (power)

## NRF54LM20A-CAAA-R
designator U?
IC Rf Txrx+mcu 802.15.4 61-XFBGA; Manufacturer: Nordic Semiconductor; Supplier: DigiKey; Supplier Part Number: 4823-NRF54LM20A-CAAA-RTR-ND; Manufacturer Part Number: NRF54LM20A-CAAA-R; Category: RF Receivers, Transceivers; Pricing: 7000=2.93286 (USD)
part A pins: A1 XC2, A2 XC1, A9 P2.01/FLPR.0/QSPI.SCK/SPIM00.SCK/SPIS00.SCK, A10 P2.00/FLPR.4/QSPI.D3/SPIM00.DCX/UARTE00.RXD, B4 P1.15/ASO[2]/RADIO[0], B5 P1.16/ASI[2]/RADIO[1], B6 P1.20/RADIO[5]/XL1, B7 P1.21/RADIO[6]/XL2, B8 P1.26/ASI[3], B9 P2.03/FLPR.3/QSPI.D2, B10 P2.02/FLPR.1/QSPI.D0/SPIM00.SDO/SPIS00.SDO/UARTE00.TXD, C1 ANT, D5 SWDCLK, D6 P1.22, D7 P1.25/ASO[3], D8 P1.28, D9 P2.05/FLPR.5/QSPI.CSN/SPIM00.CSN/SPIS00.CSN/UARTE00.RTS, D10 P2.04/FLPR.2/QSPI.D1/SPIM00.SDI/SPIS00.SDI/UARTE00.CTS, E2 nRESET, E4 SWDIO, E5 P1.19/RADIO[4], E6 P1.24, E7 P1.27, E8 P1.01/NFC1, E9 P1.29/AIN3, F1 P1.13, F2 P1.11, F4 P1.14, F5 P3.03, F6 P3.01, F7 P1.05/AIN5/ASO[0], F8 P1.02/NFC2, F9 P1.30/AIN2, G1 P0.08, G2 P0.07, G4 P3.05, G5 P3.04, G6 TXRTUNE, G7 P1.06/AIN4/ASI[0], G8 P1.04/AIN6, G9 P1.03/AIN7, G10 P1.31/AIN1, H1 P0.06, H2 P0.04, H4 P0.03, H5 P1.07/EXTREF, H6 D-, H7 D+, H10 P1.00/AIN0
part B pins: A4 VDD, A5 DCC, A6 DECD, A7 VSS, A8 DECA, B2 DECRF, D3 VSS, E1 VSS_PA, E10 VDD, F10 VSS, H8 DECUSB, H9 VBUS

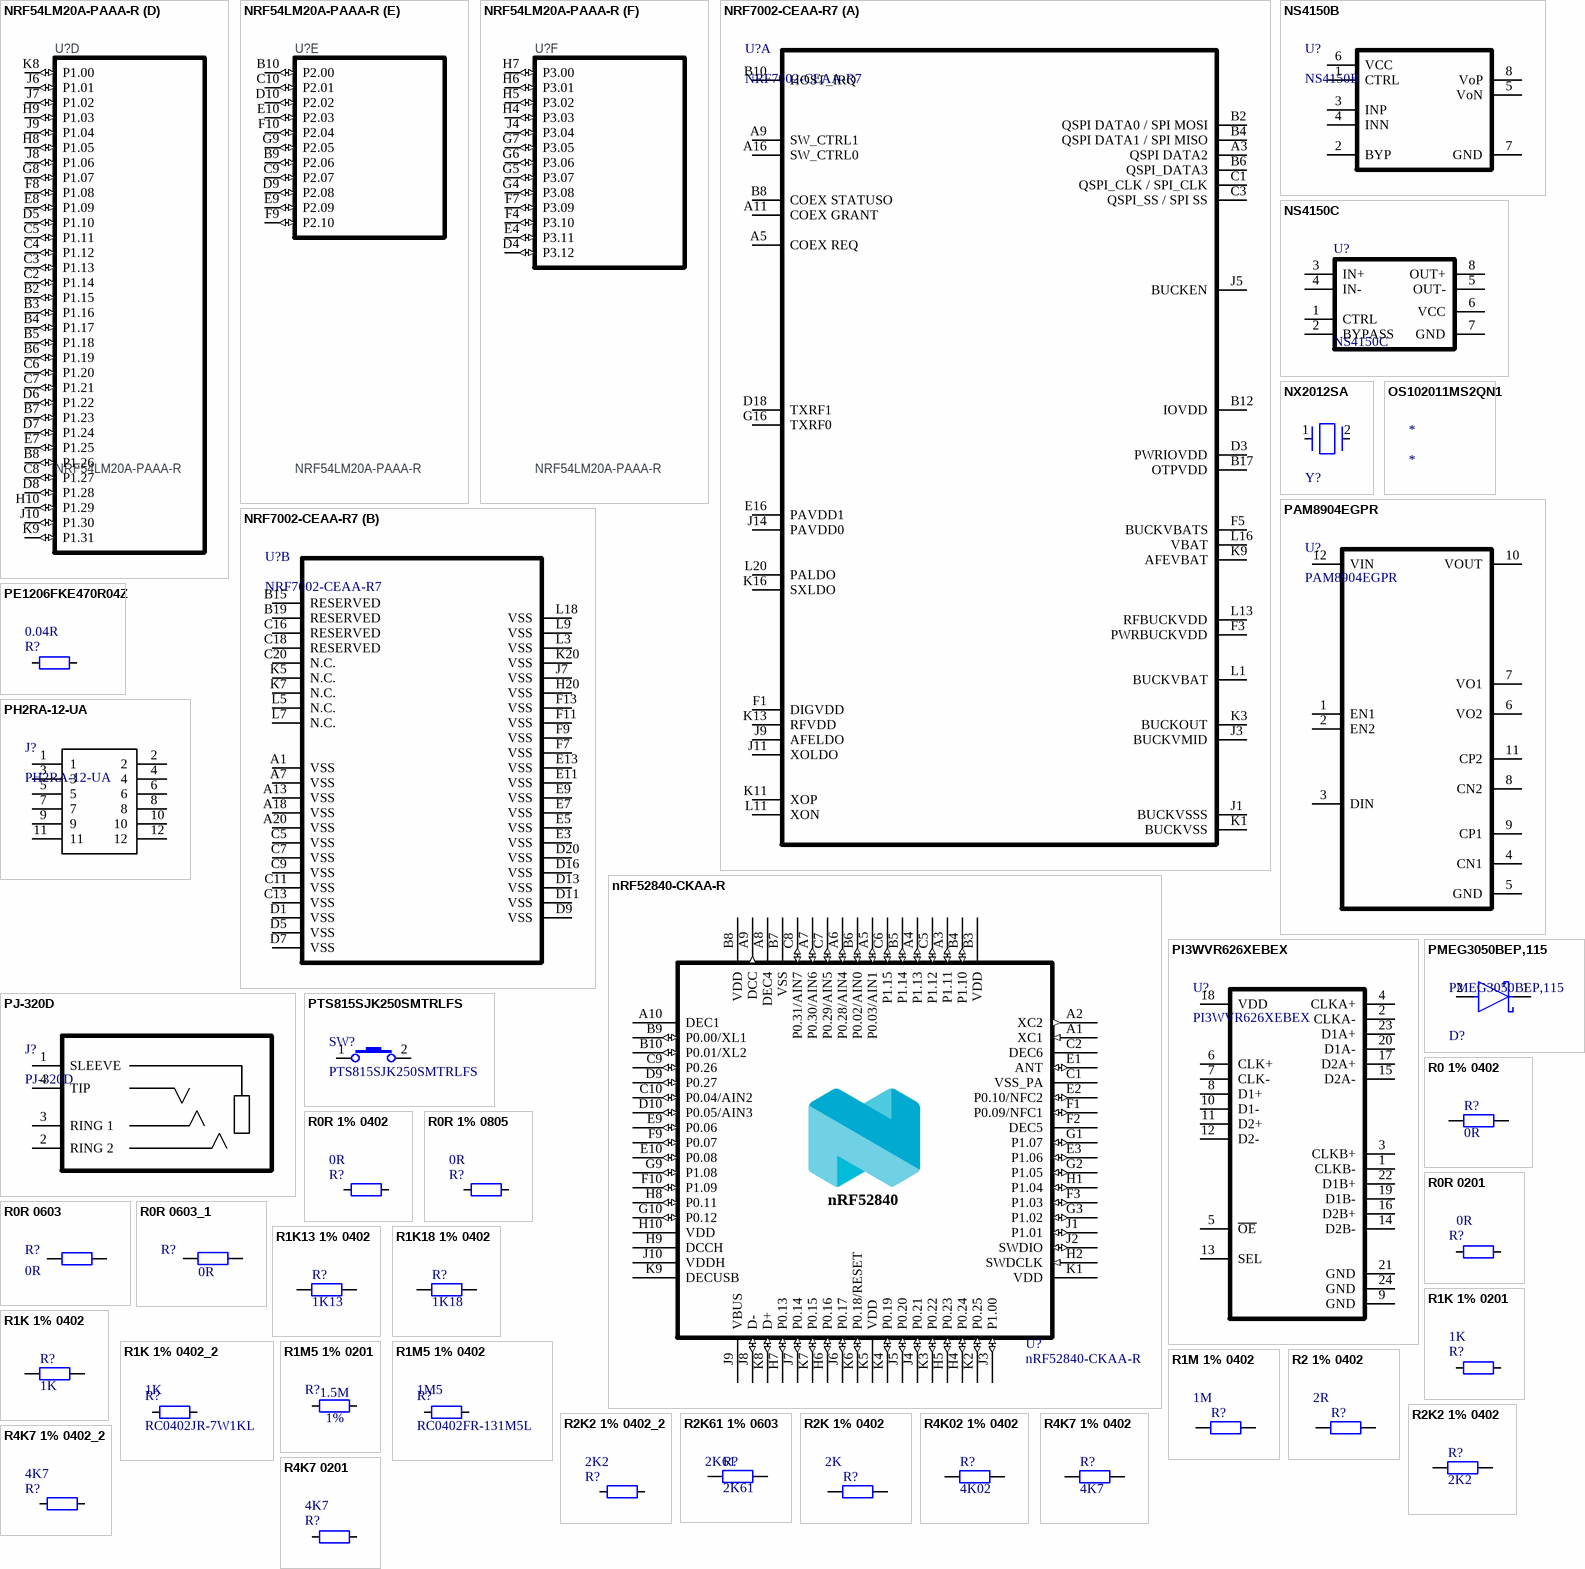
[diagram p9: symbols NRF54LM20A-PAAA-R to R4K7 0201]

## NRF54LM20A-PAAA-R
designator U?
Wireless Soc/arm CORTEX-M33/128MHZ/FCCSP Rohs Compliant: Yes; Manufacturer: Nordic Semiconductor; Author: getr; ComponentLink1URL: N.A.; ComponentLink1Description: Datasheet; ComponentLink2URL: N.A.; ComponentLink2Description: Supplier link; Supplier: DigiKey; Supplier Part Number: 4823-NRF54LM20A-PAAA-RTR-ND; Manufacturer Part Number: NRF54LM20A-PAAA-R; Category: System on Chip (SoC); Pricing: 7000=3.15874 (USD)
footprint BGA98C35P10X10_367X385X86 (BGA, 98-Leads, Body 3.67x3.85mmx0.86mm, Pitch 0.35mm)
part A pins: A1 VSS (power), A3 VDD (power), A4 VDD (power), A5 DCC (power), A6 DECD (power), A7 VSS (power), A8 DECA (power), A9 VDD (power), A10 VSS (power), C1 DECRF (power), E5 VSS (power), E6 VSS (power), F5 VSS (power), F6 VSS (power), G10 VDD (power), H1 VDD (power), K1 VSS (power), K6 DECUSB (power), K7 VBUS (power), K10 VSS (power)
part B pins: A2 XC1 (in), B1 XC2 (out), D1 VSS (power), D2 VSS (power), E1 ANT (io), F1 VSS (power), F2 nRESET (in), G1 SWDCLK (in), G2 SWDIO (io), J5 TXRTUNE (in), K4 D- (io), K5 D+ (io)
part C pins: E3 P0.09 (io), F3 P0.08 (io), G3 P0.07 (io), H2 P0.06 (io), H3 P0.05 (io), J1 P0.04 (io), J2 P0.03 (io), J3 P0.02 (io), K2 P0.01 (io), K3 P0.00 (io)
part D pins: B2 P1.15 (io), B3 P1.16 (io), B4 P1.17 (io), B5 P1.18 (io), B6 P1.19 (io), B7 P1.23 (io), B8 P1.26 (io), C2 P1.14 (io), C3 P1.13 (io), C4 P1.12 (io), C5 P1.11 (io), C6 P1.20 (io), C7 P1.21 (io), C8 P1.27 (io), D5 P1.10 (io), D6 P1.22 (io), D7 P1.24 (io), D8 P1.28 (io), E7 P1.25 (io), E8 P1.09 (io), F8 P1.08 (io), G8 P1.07 (io), H8 P1.05 (io), H9 P1.03 (io), H10 P1.29 (io), J6 P1.01 (io), J7 P1.02 (io), J8 P1.06 (io), J9 P1.04 (io), J10 P1.30 (io), K8 P1.00 (io), K9 P1.31 (io)
part E pins: B9 P2.06 (io), B10 P2.00 (io), C9 P2.07 (io), C10 P2.01 (io), D9 P2.08 (io), D10 P2.02 (io), E9 P2.09 (io), E10 P2.03 (io), F9 P2.10 (io), F10 P2.04 (io), G9 P2.05 (io)
part F pins: D4 P3.12 (io), E4 P3.11 (io), F4 P3.10 (io), F7 P3.09 (io), G4 P3.08 (io), G5 P3.07 (io), G6 P3.06 (io), G7 P3.05 (io), H4 P3.03 (io), H5 P3.02 (io), H6 P3.01 (io), H7 P3.00 (io), J4 P3.04 (io)

## NRF7002-CEAA-R7
designator U?
NRF7002 Series 2.4/5 GHz 802.11a/b/g/n/ac/ax Wireless Companion IC - WLCSP-81; Manufacturer: Nordic Semiconductor; Supplier: Mouser; Supplier Part Number: 949-NRF7002-CEAA-R7; Manufacturer Part Number: NRF7002-CEAA-R7; Category: RF Receivers, Transceivers; Pricing: 1=2.58, 10=2.58, 50=2.58, 100=2.32, 1000=2.32, 10000=2.32 (USD); ComponentLink1URL: https://datasheet.octopart.com:443/NRF7002-CEAA-R7-Nordic-Semiconductor-datasheet-189103480.pdf?src-supplier=Future+Electronics; ComponentLink1Description: https://datasheet.octopart.com:443/NRF7002-CEAA-R7-Nordic-Semiconductor-datasheet-189103480.pdf?src-supplier=Future+Electronics
footprint nRF7002_WCLSP
part A pins: A3 QSPI DATA2 "QSPI data", A5 COEX REQ "Coex interface", A9 SW_CTRL1 "External switch control", A11 COEX GRANT "Coex interface", A16 SW_CTRL0 "External switch control", B2 QSPI DATA0 / SPI MOSI "QSPI data / SPI data", B4 QSPI DATA1 / SPI MISO "QSPI data / SPI data", B6 QSPI_DATA3 "QSPI data", B8 COEX STATUSO "Coex interface", B10 HOST_IRQ "Host processor interrupt request", B12 IOVDD, B17 OTPVDD, C1 QSPI_CLK / SPI_CLK "QSPI Clock / SPI Clock", C3 QSPI_SS / SPI SS "QSPI Slave select / SPI Slave select", D3 PWRIOVDD, D18 TXRF1 "5 GHz", E16 PAVDD1, F1 DIGVDD, F3 PWRBUCKVDD, F5 BUCKVBATS, G16 TXRF0 "2.4 GHz", J1 BUCKVSSS "DCDC silent GND. Must be connected to global ground (VSS)", J3 BUCKVMID "Voltage reference decoupling pin", J5 BUCKEN "PWR IP enable pin", J9 AFELDO, J11 XOLDO, J14 PAVDD0, K1 BUCKVSS "DCDC GND", K3 BUCKOUT "DCDC output", K9 AFEVBAT, K11 XOP "40 MHz crystal (or TCXO output if using an external TCXO)", K13 RFVDD, K16 SXLDO, L1 BUCKVBAT, L11 ΧΟΝ "40 MHz crystal (or N.C. if using an external TCXO)", L13 RFBUCKVDD, L16 VBAT, L20 PALDO
part B pins: A1 VSS "Chip GND. Must be connected to global ground (VSS)", A7 VSS "Chip GND. Must be connected to global ground (VSS)", A13 VSS "Chip GND. Must be connected to global ground (VSS)", A18 VSS "Chip GND. Must be connected to global ground (VSS)", A20 VSS "Chip GND. Must be connected to global ground (VSS)", B15 RESERVED "Do not connect", B19 RESERVED "Do not connect", C5 VSS "Chip GND. Must be connected to global ground (VSS)", C7 VSS "Chip GND. Must be connected to global ground (VSS)", C9 VSS "Chip GND. Must be connected to global ground (VSS)", C11 VSS "Chip GND. Must be connected to global ground (VSS)", C13 VSS "Chip GND. Must be connected to global ground (VSS)", C16 RESERVED "Do not connect", C18 RESERVED "Do not connect", C20 N.C. "Do not connect", D1 VSS "Chip GND. Must be connected to global ground (VSS)", D5 VSS "Chip GND. Must be connected to global ground (VSS)", D7 VSS "Chip GND. Must be connected to global ground (VSS)", D9 VSS "Chip GND. Must be connected to global ground (VSS)", D11 VSS "Chip GND. Must be connected to global ground (VSS)", D13 VSS "Chip GND. Must be connected to global ground (VSS)", D16 VSS "Chip GND. Must be connected to global ground (VSS)", D20 VSS "Chip GND. Must be connected to global ground (VSS)", E3 VSS "Chip GND. Must be connected to global ground (VSS)", E5 VSS "Chip GND. Must be connected to global ground (VSS)", E7 VSS "Chip GND. Must be connected to global ground (VSS)", E9 VSS "Chip GND. Must be connected to global ground (VSS)", E11 VSS "Chip GND. Must be connected to global ground (VSS)", E13 VSS "Chip GND. Must be connected to global ground (VSS)", F7 VSS "Chip GND. Must be connected to global ground (VSS)", F9 VSS "Chip GND. Must be connected to global ground (VSS)", F11 VSS "Chip GND. Must be connected to global ground (VSS)", F13 VSS "Chip GND. Must be connected to global ground (VSS)", H20 VSS "Chip GND. Must be connected to global ground (VSS)", J7 VSS "Chip GND. Must be connected to global ground (VSS)", K5 N.C. "Do not connect", K7 N.C. "Do not connect", K20 VSS "Chip GND. Must be connected to global ground (VSS)", L3 VSS "Chip GND. Must be connected to global ground (VSS)", L5 N.C. "Do not connect", L7 N.C. "Do not connect", L9 VSS "Chip GND. Must be connected to global ground (VSS)", L18 VSS "Chip GND. Must be connected to global ground (VSS)"

## nRF52840-CKAA-R
designator U?
2MBPS 802.15.4, Bluetooth 2.4GHZ Adc, I2S, Pdm, Pwm, Spi, Uart, Usb WLCSP-93 Rf Transceiver Ics Rohs; Manufacturer: Nordic Semiconductor; Pad Count: 94; Current - Receiving: 11.1mA; Current - Transmitting: 32.7mA; Interface: I2C, I2S, SPI, UART, USB; Clock Frequency: 2.485GHz; Max Supply Voltage: 3.6V; Min Supply Voltage: 1.7V; Nominal Supply Current: 4.8mA; Number of ADC Channels: 8; Number of GPIO: 48; Operating Supply Voltage: 3V; Part Number: nRF52840-CKAA; LatestRevisionDate: 2021-02-12; Published: 2017-04-18; Value: nRF52840-CKAA; Footprint Doc: WLCSP-94; Supplier: DigiKey; Supplier Part Number: 4823-NRF52840-CKAA-RCT-ND; Manufacturer Part Number: NRF52840-CKAA-R; RoHS: Compliant; Category: RF Receivers, Transceivers; Pricing: 1=4.14, 10=4.054 (USD); Ambient Temperature Range High: 85°C; Data Rate: 2Mbps; Height - Seated (Max): 514µm; Harmonized Tariff Schedule (HTS) Code: 8542.31.00.30; Length: 3.607mm; Lifecycle Status: NRND; Max Operating Temperature: 85°C; Min Operating Temperature: -40°C; Number of Terminals: 94; Schedule B: 8542390000|8542390000; Terminal Pitch: 350µm; Width: 3.544mm; ComponentLink1URL: https://datasheet.octopart.com:443/NRF52840-CKAA-R-Nordic-Semiconductor-datasheet-151884367.pdf?src-supplier=Upverter; ComponentLink1Description: https://datasheet.octopart.com:443/NRF52840-CKAA-R-Nordic-Semiconductor-datasheet-151884367.pdf?src-supplier=Upverter; ComponentLink2URL: https://datasheet.octopart.com:443/NRF52840-CKAA-R-Nordic-Semiconductor-datasheet-189103475.pdf?src-supplier=Future+Electronics; ComponentLink2Description: https://datasheet.octopart.com:443/NRF52840-CKAA-R-Nordic-Semiconductor-datasheet-189103475.pdf?src-supplier=Future+Electronics; Supplier 1: Mouser; Supplier Part Number 1: 949-NRF52840-CKAA-R; Supplier 2: DigiKey; Supplier Part Number 2: 4823-NRF52840-CKAA-RCT-ND; Supplier 3: DigiKey; Supplier Part Number 3: 4823-NRF52840-CKAA-RTR-ND
footprint BGA94C35P10X10_352X356X50
pins: A1 XC1 (in), A2 XC2 (out), A3 P1.11 (io), A4 P1.13 (io), A5 P0.03/AIN1 (io), A6 P0.28/AIN4 (io), A7 P0.30/AIN6 (io), A8 DEC4 (power), A9 DCC (out), A10 DEC1 (power), B3 VDD (power), B4 P1.10 (io), B5 P1.14 (io), B6 P0.02/AIN0 (io), B7 VSS (power), B8 VDD (power), B9 P0.00/XL1 (io), B10 P0.01/XL2 (io), C1 VSS_PA (power), C2 DEC6 (power), C4 GND (power) hidden to GND, C5 P1.12 (io), C6 P1.15 (io), C7 P0.29/AIN5 (io), C8 P0.31/AIN7 (io), C9 P0.26 (io), C10 P0.04/AIN2 (io), D3 GND (power) hidden to GND, D4 GND (power) hidden to GND, D5 GND (power) hidden to GND, D6 GND (power) hidden to GND, D7 GND (power) hidden to GND, D8 GND (power) hidden to GND, D9 P0.27 (io), D10 P0.05/AIN3 (io), E1 ANT (io), E2 P0.10/NFC2 (io), E3 P1.06 (io), E4 GND (power) hidden to GND, E5 GND (power) hidden to GND, E6 GND (power) hidden to GND, E7 GND (power) hidden to GND, E8 GND (power) hidden to GND, E9 P0.06 (io), E10 P0.08 (io), F1 P0.09/NFC1 (io), F2 DEC5 (power), F3 P1.03 (io), F4 GND (power) hidden to GND, F5 GND (power) hidden to GND, F6 GND (power) hidden to GND, F7 GND (power) hidden to GND, F8 GND (power) hidden to GND, F9 P0.07 (io), F10 P1.09 (io), G1 P1.07 (io), G2 P1.05 (io), G3 P1.02 (io), G4 GND (power) hidden to GND, G5 GND (power) hidden to GND, G6 GND (power) hidden to GND, G7 GND (power) hidden to GND, G8 GND (power) hidden to GND, G9 P1.08 (io), G10 P0.12 (io), H1 P1.04 (io), H2 SWDCLK (in), H4 P0.24 (io), H5 P0.23 (io), H6 P0.16 (io), H7 P0.13 (io), H8 P0.11 (io), H9 DCCH (power), H10 VDD (power), J1 P1.01 (io), J2 SWDIO (io), J3 P1.00 (io), J4 P0.21 (io), J5 P0.20 (io), J6 P0.17 (io), J7 P0.14 (io), J8 D- (io), J9 VBUS (power), J10 VDDH (power), K1 VDD (power), K2 P0.25 (io), K3 P0.22 (io), K4 P0.19 (io), K5 VDD (power), K6 P0.18/RESET (io), K7 P0.15 (io), K8 D+ (io), K9 DECUSB (power), K10 GND (power) hidden to GND
text: nRF52840

## NS4150B
designator U?
footprint TSOP65P490X110-8N (TSOP, 8-Leads, Body 3.00x3.00mm, Pitch 0.65mm, IPC Medium Density)
pins: 1 CTRL, 2 BYP, 3 INP, 4 INN, 5 VoN, 6 VCC, 7 GND, 8 VoP

## NS4150C
designator U?
NS4150C 3.0W Mono Class-D Audio Power Amplifier; Manufacturer: NSIWAY; Manufacturer Part Number: NS4150C; Supplier Part Number: C2875838; Supplier: LCSC; Supplier Unit Price: 0.1556; Arrow Price/Stock: *; Datasheet: https://www.lcsc.com/datasheet/C2875838.pdf?spm=wm.sxq.inf.ggs&lcsc_vid=QFJcU1NQFVUKBFFURwRcVQVVFgcLUAIDRwddAlJQTlQxVlNeRFBcVFFXQFZdUzsOAxUeFF5JWBYZEEoBGA4JCwFIFA4DSA%3D%3D
footprint SOIC127P600X175-8N
pins: 1 CTRL, 2 BYPASS, 3 IN+, 4 IN-, 5 OUT-, 6 VCC, 7 GND, 8 OUT+

## NX2012SA
designator Y?, comment NX2012SA-32.768K-STD-MUB-1  (value not drawn)
Parallel - Fundamental Quartz Crystal, 0.032768MHz Nom; Manufacturer: NDK; ESR (Equivalent Series Resistance): 80kΩ; Frequency: 32.768kHz; Frequency Stability: 144ppm; Frequency Tolerance: 0.002%; Load Capacitance: 12.5pF; Supplier: Mouser; Supplier Part Number: 344-NX2012SA32768K1; Manufacturer Part Number: NX2012SA-32.768K-STD-MUB-1; RoHS: Compliant; Category: Crystals; Stock: 14411; Pricing: 1=0.85, 10=0.73, 50=0.659, 100=0.63, 1000=0.559, 10000=0.474 (USD); Case/Package: SMD/SMT; Height: 600µm; Length: 2.0574mm; Lifecycle Status: Production; Max Operating Temperature: 85°C; Min Operating Temperature: -40°C; Mounting Technology: Surface Mount; Packaging: Tape & Reel (TR); REACH SVHC: Yes; ESR: 80kΩ; Tolerance: 0.002%; Width: 1.1938mm; ComponentLink1URL: https://datasheet.octopart.com:443/NX2012SA-32.768K-STD-MUB-1-NDK-datasheet-155374964.pdf?src-supplier=Upverter; ComponentLink1Description: https://datasheet.octopart.com:443/NX2012SA-32.768K-STD-MUB-1-NDK-datasheet-155374964.pdf?src-supplier=Upverter; ComponentLink2URL: https://datasheet.octopart.com:443/NX2012SA-32.768K-STD-MUB-1-NDK-datasheet-180926109.pdf?src-supplier=IHS; ComponentLink2Description: https://datasheet.octopart.com:443/NX2012SA-32.768K-STD-MUB-1-NDK-datasheet-180926109.pdf?src-supplier=IHS; Supplier 1: Mouser; Supplier Part Number 1: 344-NX2012SA32768K1
footprint NX2012SA (Footprint not found)
pins: 1, 2

## OS102011MS2QN1
designator *

## PAM8904EGPR
designator U?
Amplifier, -40 To 150Deg C, W-Qfn2020-12 Rohs Compliant: Yes |Diodes Inc. PAM8904EGPR; Max Output current: 49mA; Max Supply Voltage: 5.5V; Min Supply Voltage: 1.5V; Number of Channels: 1; Operating Supply Voltage: 3V; Supplier: DigiKey; Supplier Part Number: 31-PAM8904EGPRCT-ND; Manufacturer: Diodes Inc.; Manufacturer Part Number: PAM8904EGPR; RoHS: Compliant; Category: Power Management - Specialized; Stock: 7992; Pricing: 1=0.66, 10=0.469, 25=0.4208, 100=0.3678, 250=0.34244, 500=0.32718, 1000=0.31462 (USD); China RoHS: Compliant; Height - Seated (Max): 800µm; Length: 2mm; Lifecycle Status: Production; Max Operating Temperature: 85°C; Min Operating Temperature: -40°C; Number of Circuits: 1; Number of Terminals: 12; Number of Transmitters: 1; REACH SVHC: Yes; Terminal Pitch: 400µm; Width: 2mm; ComponentLink1URL: https://datasheet.octopart.com:443/PAM8904EGPR-Diodes-Inc.-datasheet-180558614.pdf?src-supplier=IHS; ComponentLink1Description: https://datasheet.octopart.com:443/PAM8904EGPR-Diodes-Inc.-datasheet-180558614.pdf?src-supplier=IHS; ComponentLink2URL: https://datasheet.octopart.com:443/PAM8904EGPR-Diodes-Inc.-datasheet-149521390.pdf?src-supplier=Future+Electronics; ComponentLink2Description: https://datasheet.octopart.com:443/PAM8904EGPR-Diodes-Inc.-datasheet-149521390.pdf?src-supplier=Future+Electronics; ComponentLink3URL: https://sigma.octopart.com:443/151210954/technical_drawing/Diodes-Inc.-PAM8904EGPR.pdf?src-supplier=Diodes+Inc+SCT; ComponentLink3Description: https://sigma.octopart.com:443/151210954/technical_drawing/Diodes-Inc.-PAM8904EGPR.pdf?src-supplier=Diodes+Inc+SCT; Supplier 1: DigiKey; Supplier Part Number 1: 31-PAM8904EGPRCT-ND; Supplier 2: DigiKey; Supplier Part Number 2: 31-PAM8904EGPRTR-ND; Supplier 3: Mouser; Supplier Part Number 3: 621-PAM8904EGPR
footprint QFN40P200X200X65_HS-13N (QFN, 12-Leads, Body 2.00x2.00mm, Pitch 0.40mm, Thermal Pad 0.90x0.90mm, IPC Medium Density)
pins: 1 EN1, 2 EN2, 3 DIN, 4 CN1, 5 GND, 6 VO2, 7 VO1, 8 CN2, 9 CP1, 10 VOUT, 11 CP2, 12 VIN

## PE1206FKE470R04Z
designator R?  value 0.04R  (hidden comment: PE1206FKE470R04Z)
Fixed Resistor, Metal Foil, 1W, 0.04ohm, 0.2V, 1% +/-Tol, 50ppm/Cel, Surface Mount, 1206; Manufacturer: Yageo Group; Temperature Coefficient: 50ppm/°C; Working Voltage: 200mV; Supplier: DigiKey; Supplier Part Number: 13-PE1206FKE470R04ZCT-ND; Manufacturer Part Number: PE1206FKE470R04Z; RoHS: Compliant; Category: Chip SMD Resistors; Stock: 8218; Pricing: 1=0.26, 10=0.166, 25=0.14, 50=0.1238, 100=0.1099, 250=0.09468, 500=0.08512, 1000=0.07698 (USD); Case/Package: 1206; Height: 600µm; Lifecycle Status: Production; Max Operating Temperature: 170°C; Min Operating Temperature: -55°C; Mounting Technology: Surface Mount; Number of Terminals: 2; Power Dissipation: 1W; REACH SVHC: Yes; Tolerance: 1%; Width: 1.6mm; ComponentLink1URL: https://datasheet.octopart.com:443/PE1206FKE470R04Z-Yageo-datasheet-31964993.pdf?src-supplier=IHS; ComponentLink1Description: https://datasheet.octopart.com:443/PE1206FKE470R04Z-Yageo-datasheet-31964993.pdf?src-supplier=IHS; ComponentLink2URL: https://datasheet.octopart.com/PE1206FKE470R04Z-Yageo-datasheet-86814871.pdf; ComponentLink2Description: https://datasheet.octopart.com/PE1206FKE470R04Z-Yageo-datasheet-86814871.pdf; ComponentLink3URL: http://sigma.octopart.com:80/conflict_mineral_statement/Yageo-company-3.pdf?src-supplier=Compliance+Statements; ComponentLink3Description: http://sigma.octopart.com:80/conflict_mineral_statement/Yageo-company-3.pdf?src-supplier=Compliance+Statements; ComponentLink4URL: http://sigma.octopart.com:80/rohs_statement/Yageo-company-2.pdf?src-supplier=Compliance+Statements; ComponentLink4Description: http://sigma.octopart.com:80/rohs_statement/Yageo-company-2.pdf?src-supplier=Compliance+Statements; Supplier 1: DigiKey; Supplier Part Number 1: 13-PE1206FKE470R04ZCT-ND; Supplier 2: DigiKey; Supplier Part Number 2: 13-PE1206FKE470R04ZTR-ND; Supplier 3: Mouser; Supplier Part Number 3: 603-PE1206FKE470R04Z
footprint RES1206-Shunt (Chip Resistor, 2-Leads, Body 3.20x1.60mm, IPC Medium Density)
pins: 1, 2